# Altium footprint library Footprint-Lib-PhilsLab.PcbLib: 544 footprints (part 33 of 34)
Each footprint in its own frame and in the unit in brackets; x right, y up, seen from the top. Pads: shape width x height; smd on the part's side, far side on the other; paste and mask are expansions set on the pad; w line width, h text height; cw(c..) or ccw(c..) is an arc to the next point about the centre after c.
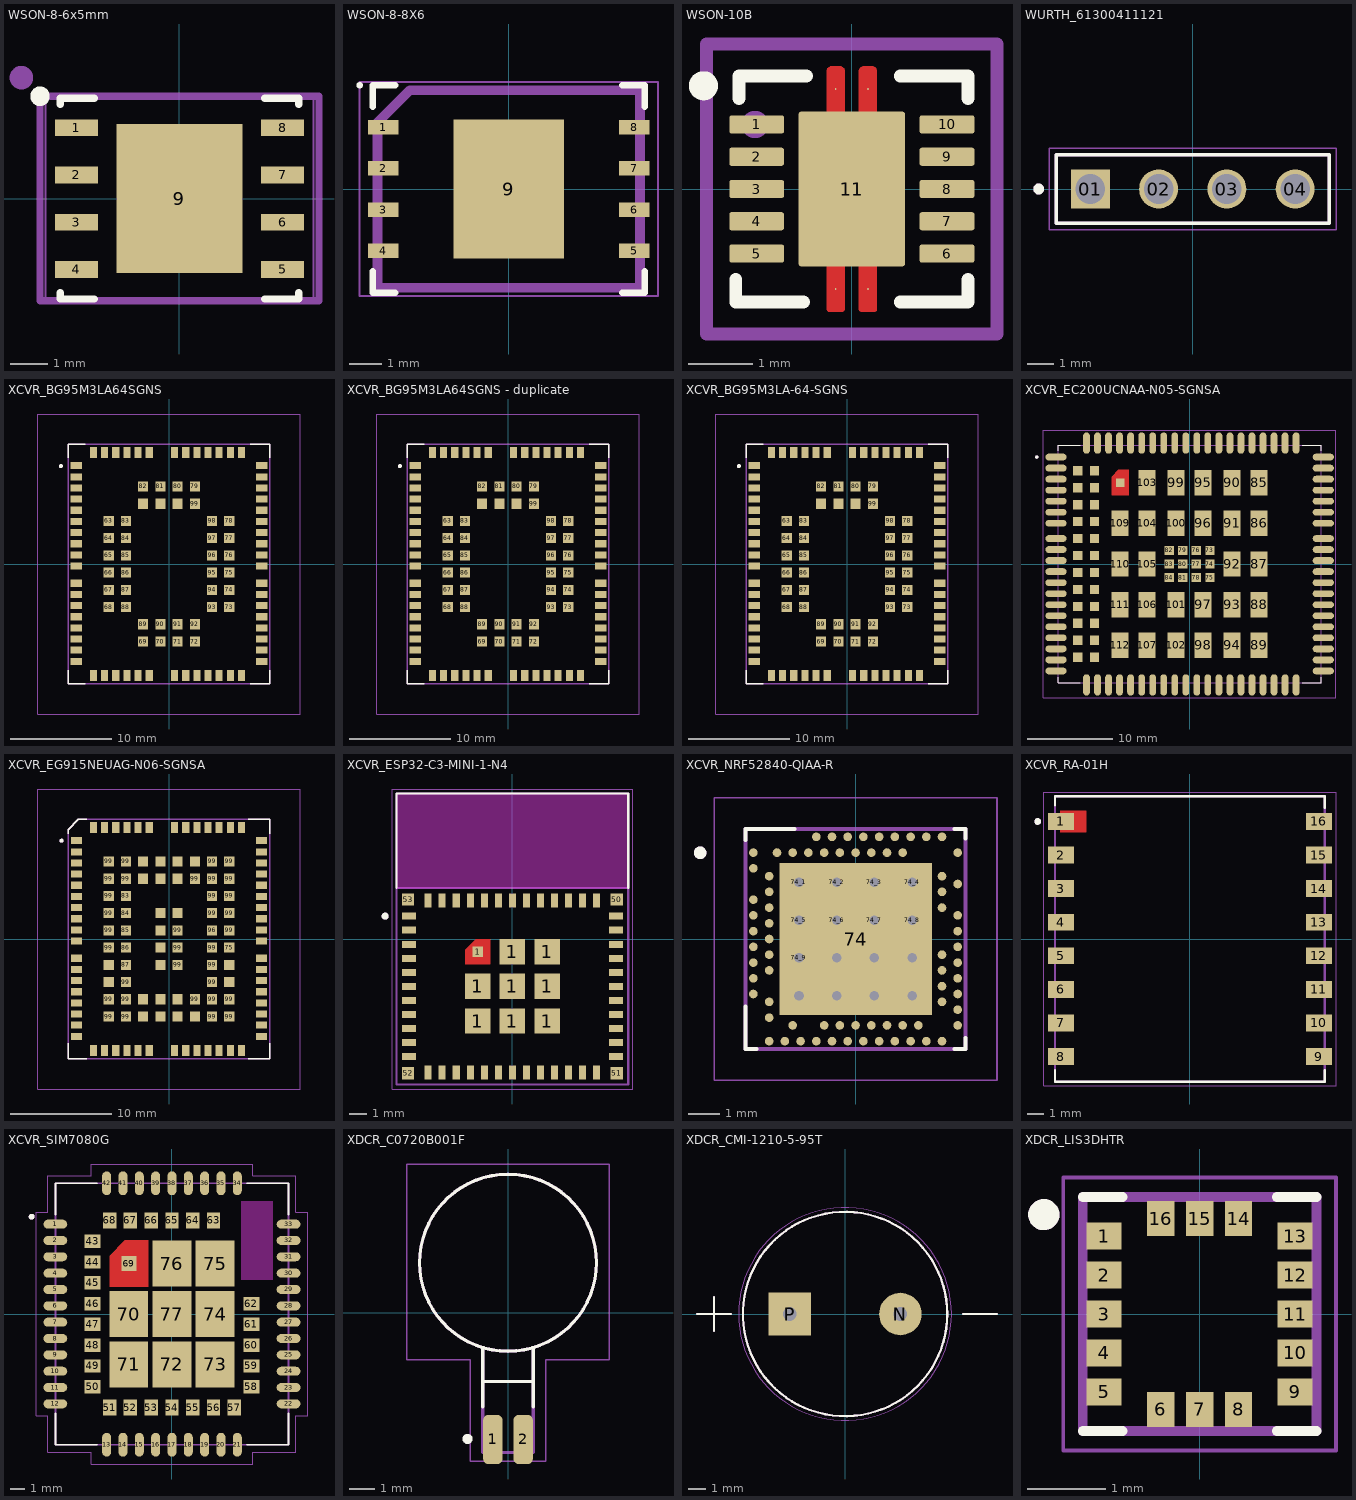
[diagram p32: the footprints below, top view; thin cyan lines are the x and y axes]

## WSON-8-6x5mm [mm]
height 0.8
pads (9):
  rect 1.15x0.45 smd: 1(-2.77,1.905) 2(-2.77,0.635) 3(-2.77,-0.635) 4(-2.77,-1.905) 5(2.77,-1.905) 6(2.77,-0.635) 7(2.77,0.635) 8(2.77,1.905)
  rect 3.4x4 smd paste-1.7: 9(0,0)
Top Overlay:
  circle w0.3: c-3.75,2.75 r0.112
  lines w0.2: -3.2,-2.53 -3.2,-2.7 -2.295,-2.7 ; -3.2,2.53 -3.2,2.7 -2.295,2.7 ; 2.295,-2.7 3.2,-2.7 3.2,-2.53 ; 2.295,2.7 3.2,2.7 3.2,2.53
Top Paste:
  rectangle: -1.595,0.765 -0.665,1.895
  rectangle: -1.595,-0.565 -0.665,0.565
  rectangle: -1.595,-1.895 -0.665,-0.765
  rectangle: -0.465,0.765 0.465,1.895
  rectangle: -0.465,-0.565 0.465,0.565
  rectangle: -0.465,-1.895 0.465,-0.765
  rectangle: 0.665,0.765 1.595,1.895
  rectangle: 0.665,-0.565 1.595,0.565
  rectangle: 0.665,-1.895 1.595,-0.765
Mechanical 13:
  circle w0.5: c-4.25,3.25 r0.064
  lines w0.2: -3.75,-2.75 -3.75,2.75 3.75,2.75 3.75,-2.75 -3.75,-2.75
  text "'.Designator'" at -5.815,-0.9 h1
Mechanical 15:
  lines w0.05: -3.605,-2.8 -3.605,2.8 3.605,2.8 3.605,-2.8 -3.605,-2.8
  lines w0.1: -0.5,0 0.5,0 ; 0,-0.5 0,0.5
3D body "WSON-8-6x5mm.step": height 0.8, standoff 0, extent -3.051,-2.55 3.051,2.55

## WSON-8-8X6 [mm] "8-Pad WSON 8x6-mm (Package Code E) (Winbond)"
height 0.8
pads (9):
  rect 0.95x0.45 smd: 1(-3.87,1.905) 2(-3.87,0.635) 3(-3.87,-0.635) 4(-3.87,-1.905) 5(3.87,-1.905) 6(3.87,-0.635) 7(3.87,0.635) 8(3.87,1.905)
  rect 3.4x4.3 smd paste-1.7: 9(0,0)
Top Overlay:
  circle w0.1: c-4.6,3.2 r0.05
  lines w0.2: -4.2,-2.53 -4.2,-3.2 -3.495,-3.2 ; -4.2,2.53 -4.2,3.2 -3.495,3.2 ; 3.495,-3.2 4.2,-3.2 4.2,-2.53 ; 3.495,3.2 4.2,3.2 4.2,2.53
Top Paste:
  rectangle: -1.595,0.815 -0.665,2.045
  rectangle: -1.595,-0.615 -0.665,0.615
  rectangle: -1.595,-2.045 -0.665,-0.815
  rectangle: -0.465,0.815 0.465,2.045
  rectangle: -0.465,-0.615 0.465,0.615
  rectangle: -0.465,-2.045 0.465,-0.815
  rectangle: 0.665,0.815 1.595,2.045
  rectangle: 0.665,-0.615 1.595,0.615
  rectangle: 0.665,-2.045 1.595,-0.815
Mechanical 13:
  lines w0.3: -4.05,-3.05 -4.05,2.05 -3.05,3.05 4.05,3.05 4.05,-3.05 -4.05,-3.05
  text "'.Designator'" at -5.84,-0.925 h1
Mechanical 15:
  lines w0.05: -4.605,-3.3 -4.605,3.3 4.605,3.3 4.605,-3.3 -4.605,-3.3
  lines w0.1: -0.5,0 0.5,0 ; 0,-0.5 0,0.5
3D body "WSON-8-8X6.step": height 0.8, standoff 0, extent -4.051,-3.05 4.051,3.05

## WSON-10B [mm]
height 0.75
pads (15):
  rrect25% 0.85x0.28 smd mask+0.05: 1(-1.475,1) 2(-1.475,0.5) 3(-1.475,0) 4(-1.475,-0.5) 5(-1.475,-1) 6(1.475,-1) 7(1.475,-0.5) 8(1.475,0) 9(1.475,0.5) 10(1.475,1)
  round 0.025 smd mask+0.12: 11(-0.25,-1.55) 11(-0.25,1.55) 11(0.25,-1.55) 11(0.25,1.55)
  rrect5% 1.65x2.4 smd mask+0.05: 11(0,0)
Top Layer:
  region: -0.11,1.83 -0.11,1.2 -0.39,1.2 -0.39,1.83 -0.39,1.844 -0.379,1.87 -0.36,1.889 -0.334,1.9 -0.32,1.9 -0.18,1.9 -0.166,1.9 -0.14,1.889 -0.121,1.87 -0.11,1.844
  region: 0.39,1.83 0.39,1.2 0.11,1.2 0.11,1.83 0.11,1.844 0.121,1.87 0.14,1.889 0.166,1.9 0.18,1.9 0.32,1.9 0.334,1.9 0.36,1.889 0.379,1.87 0.39,1.844
  region: 0.39,-1.865 0.39,-1.872 0.385,-1.885 0.375,-1.895 0.362,-1.9 0.355,-1.9 0.145,-1.9 0.138,-1.9 0.125,-1.895 0.115,-1.885 0.11,-1.872 0.11,-1.865 0.11,-1.2 0.39,-1.2
  region: -0.11,-1.865 -0.11,-1.872 -0.115,-1.885 -0.125,-1.895 -0.138,-1.9 -0.145,-1.9 -0.355,-1.9 -0.362,-1.9 -0.375,-1.895 -0.385,-1.885 -0.39,-1.872 -0.39,-1.865 -0.39,-1.2 -0.11,-1.2
Top Overlay:
  circle w0.25: c-2.3,1.6 r0.1
  lines w0.2: -1.8,-1.4 -1.8,-1.75 -0.75,-1.75 ; -1.75,1.4 -1.75,1.75 -0.7,1.75 ; 0.75,-1.75 1.8,-1.75 1.8,-1.4 ; 0.75,1.75 1.8,1.75 1.8,1.4
Mechanical 13:
  circle w0.3: c-1.5,1 r0.061
  lines w0.2: -2.25,-2.25 2.25,-2.25 2.25,2.25 -2.25,2.25 -2.25,-2.25
  text "'.Designator'" at -5.665,-0.417 h1
3D body "TCKE812NL,RF.stp": height 0.85, standoff 0, extent -1.5,-1.5 1.5,1.5

## WURTH_61300411121 [mm]
pads (4):
  rect 1.45x1.45 / inner round 1.45 / far side rect 1.45x1.45 hole 1.1 mask+0.05: 01(-3.81,0)
  round 1.45 hole 1.1 mask+0.05: 02(-1.27,0) 03(1.27,0) 04(3.81,0)
Top Overlay:
  circle w0.2: c-5.73,0 r0.1
  lines w0.127: -5.08,-1.27 5.08,-1.27 5.08,1.27 -5.08,1.27 -5.08,-1.27
Mechanical 13:
  circle w0.2: c-5.73,0 r0.1
  lines w0.127: -5.08,-1.27 5.08,-1.27 5.08,1.27 -5.08,1.27 -5.08,-1.27
Mechanical 15:
  lines w0.05: -5.33,-1.52 5.33,-1.52 5.33,1.52 -5.33,1.52 -5.33,-1.52

## XCVR_BG95M3LA64SGNS [mm]
pads (102):
  rect 1.1x0.7 smd paste-2: 1(-9.15,9.7) 2(-9.15,8.6) 3(-9.15,7.5) 4(-9.15,6.4) 5(-9.15,5.3) 6(-9.15,4.2) 7(-9.15,3.1) 8(-9.15,2) 9(-9.15,0.9) 10(-9.15,-0.2) 11(-9.15,-1.9) 12(-9.15,-3) 13(-9.15,-4.1) 14(-9.15,-5.2) 15(-9.15,-6.3) 16(-9.15,-7.4) 17(-9.15,-8.5) 18(-9.15,-9.6) 32(9.15,-9.6) 33(9.15,-8.5) 34(9.15,-7.4) 35(9.15,-6.3) 36(9.15,-5.2) 37(9.15,-4.1) 38(9.15,-3) 39(9.15,-1.9) 40(9.15,-0.2) 41(9.15,0.9) 42(9.15,2) 43(9.15,3.1) 44(9.15,4.2) 45(9.15,5.3) 46(9.15,6.4) 47(9.15,7.5) 48(9.15,8.6) 49(9.15,9.7)
  rect 0.7x1.1 smd paste-2: 19(-7.45,-11) 20(-6.35,-11) 21(-5.25,-11) 22(-4.15,-11) 23(-3.05,-11) 24(-1.95,-11) 25(0.55,-11) 26(1.65,-11) 27(2.75,-11) 28(3.85,-11) 29(4.95,-11) 30(6.05,-11) 31(7.15,-11) 50(7.15,11) 51(6.05,11) 52(4.95,11) 53(3.85,11) 54(2.75,11) 55(1.65,11) 56(0.55,11) 57(-1.95,11) 58(-3.05,11) 59(-4.15,11) 60(-5.25,11) 61(-6.35,11) 62(-7.45,11)
  rect 1x1 smd paste-1: 63(-5.95,4.25) 64(-5.95,2.55) 65(-5.95,0.85) 66(-5.95,-0.85) 67(-5.95,-2.55) 68(-5.95,-4.25) 69(-2.55,-7.65) 70(-0.85,-7.65) 71(0.85,-7.65) 72(2.55,-7.65) 73(5.95,-4.25) 74(5.95,-2.55) 75(5.95,-0.85) 76(5.95,0.85) 77(5.95,2.55) 78(5.95,4.25) 79(2.55,7.65) 80(0.85,7.65) 81(-0.85,7.65) 82(-2.55,7.65) 83(-4.25,4.25) 84(-4.25,2.55) 85(-4.25,0.85) 86(-4.25,-0.85) 87(-4.25,-2.55) 88(-4.25,-4.25) 89(-2.55,-5.95) 90(-0.85,-5.95) 91(0.85,-5.95) 92(2.55,-5.95) 93(4.25,-4.25) 94(4.25,-2.55) 95(4.25,-0.85) 96(4.25,0.85) 97(4.25,2.55) 98(4.25,4.25) 99(2.55,5.95) 100(0.85,5.95) 101(-0.85,5.95) 102(-2.55,5.95)
Top Overlay:
  circle w0.2: c-10.67,9.66 r0.1
  lines w0.127: -9.95,-10.5 -9.95,-11.8 -8.25,-11.8 ; -9.95,10.5 -9.95,11.8 -8.25,11.8 ; 8,-11.8 9.95,-11.8 9.95,-10.5 ; 8,11.8 9.95,11.8 9.95,10.5
Top Paste:
  drawing of 102 lines, arcs and shapes, not listed
Mechanical 13:
  circle w0.2: c-10.67,9.66 r0.1
  lines w0.127: -9.95,-11.8 -9.95,11.8 9.95,11.8 9.95,-11.8 -9.95,-11.8
Mechanical 15:
  lines w0.05: -12.95,-14.8 12.95,-14.8 12.95,14.8 -12.95,14.8 -12.95,-14.8
3D body "step_temp.STEP": height 0, standoff -2.1, extent -8,-9.35 8,9.35

## XCVR_BG95M3LA64SGNS - duplicate [mm]
pads (102):
  rect 1.1x0.7 smd paste-2: 1(-9.15,9.7) 2(-9.15,8.6) 3(-9.15,7.5) 4(-9.15,6.4) 5(-9.15,5.3) 6(-9.15,4.2) 7(-9.15,3.1) 8(-9.15,2) 9(-9.15,0.9) 10(-9.15,-0.2) 11(-9.15,-1.9) 12(-9.15,-3) 13(-9.15,-4.1) 14(-9.15,-5.2) 15(-9.15,-6.3) 16(-9.15,-7.4) 17(-9.15,-8.5) 18(-9.15,-9.6) 32(9.15,-9.6) 33(9.15,-8.5) 34(9.15,-7.4) 35(9.15,-6.3) 36(9.15,-5.2) 37(9.15,-4.1) 38(9.15,-3) 39(9.15,-1.9) 40(9.15,-0.2) 41(9.15,0.9) 42(9.15,2) 43(9.15,3.1) 44(9.15,4.2) 45(9.15,5.3) 46(9.15,6.4) 47(9.15,7.5) 48(9.15,8.6) 49(9.15,9.7)
  rect 0.7x1.1 smd paste-2: 19(-7.45,-11) 20(-6.35,-11) 21(-5.25,-11) 22(-4.15,-11) 23(-3.05,-11) 24(-1.95,-11) 25(0.55,-11) 26(1.65,-11) 27(2.75,-11) 28(3.85,-11) 29(4.95,-11) 30(6.05,-11) 31(7.15,-11) 50(7.15,11) 51(6.05,11) 52(4.95,11) 53(3.85,11) 54(2.75,11) 55(1.65,11) 56(0.55,11) 57(-1.95,11) 58(-3.05,11) 59(-4.15,11) 60(-5.25,11) 61(-6.35,11) 62(-7.45,11)
  rect 1x1 smd paste-1: 63(-5.95,4.25) 64(-5.95,2.55) 65(-5.95,0.85) 66(-5.95,-0.85) 67(-5.95,-2.55) 68(-5.95,-4.25) 69(-2.55,-7.65) 70(-0.85,-7.65) 71(0.85,-7.65) 72(2.55,-7.65) 73(5.95,-4.25) 74(5.95,-2.55) 75(5.95,-0.85) 76(5.95,0.85) 77(5.95,2.55) 78(5.95,4.25) 79(2.55,7.65) 80(0.85,7.65) 81(-0.85,7.65) 82(-2.55,7.65) 83(-4.25,4.25) 84(-4.25,2.55) 85(-4.25,0.85) 86(-4.25,-0.85) 87(-4.25,-2.55) 88(-4.25,-4.25) 89(-2.55,-5.95) 90(-0.85,-5.95) 91(0.85,-5.95) 92(2.55,-5.95) 93(4.25,-4.25) 94(4.25,-2.55) 95(4.25,-0.85) 96(4.25,0.85) 97(4.25,2.55) 98(4.25,4.25) 99(2.55,5.95) 100(0.85,5.95) 101(-0.85,5.95) 102(-2.55,5.95)
Top Overlay:
  circle w0.2: c-10.67,9.66 r0.1
  lines w0.127: -9.95,-10.5 -9.95,-11.8 -8.25,-11.8 ; -9.95,10.5 -9.95,11.8 -8.25,11.8 ; 8,-11.8 9.95,-11.8 9.95,-10.5 ; 8,11.8 9.95,11.8 9.95,10.5
Top Paste:
  drawing of 102 lines, arcs and shapes, not listed
Mechanical 13:
  circle w0.2: c-10.67,9.66 r0.1
  lines w0.127: -9.95,-11.8 -9.95,11.8 9.95,11.8 9.95,-11.8 -9.95,-11.8
Mechanical 15:
  lines w0.05: -12.95,-14.8 12.95,-14.8 12.95,14.8 -12.95,14.8 -12.95,-14.8
3D body "step_temp.STEP": height 2.54, standoff 0.44, extent -7.493,-8.382 8.507,10.318

## XCVR_BG95M3LA-64-SGNS [mm]
pads (102):
  rect 1.1x0.7 smd paste-2: 1(-9.15,9.7) 2(-9.15,8.6) 3(-9.15,7.5) 4(-9.15,6.4) 5(-9.15,5.3) 6(-9.15,4.2) 7(-9.15,3.1) 8(-9.15,2) 9(-9.15,0.9) 10(-9.15,-0.2) 11(-9.15,-1.9) 12(-9.15,-3) 13(-9.15,-4.1) 14(-9.15,-5.2) 15(-9.15,-6.3) 16(-9.15,-7.4) 17(-9.15,-8.5) 18(-9.15,-9.6) 32(9.15,-9.6) 33(9.15,-8.5) 34(9.15,-7.4) 35(9.15,-6.3) 36(9.15,-5.2) 37(9.15,-4.1) 38(9.15,-3) 39(9.15,-1.9) 40(9.15,-0.2) 41(9.15,0.9) 42(9.15,2) 43(9.15,3.1) 44(9.15,4.2) 45(9.15,5.3) 46(9.15,6.4) 47(9.15,7.5) 48(9.15,8.6) 49(9.15,9.7)
  rect 0.7x1.1 smd paste-2: 19(-7.45,-11) 20(-6.35,-11) 21(-5.25,-11) 22(-4.15,-11) 23(-3.05,-11) 24(-1.95,-11) 25(0.55,-11) 26(1.65,-11) 27(2.75,-11) 28(3.85,-11) 29(4.95,-11) 30(6.05,-11) 31(7.15,-11) 50(7.15,11) 51(6.05,11) 52(4.95,11) 53(3.85,11) 54(2.75,11) 55(1.65,11) 56(0.55,11) 57(-1.95,11) 58(-3.05,11) 59(-4.15,11) 60(-5.25,11) 61(-6.35,11) 62(-7.45,11)
  rect 1x1 smd paste-1: 63(-5.95,4.25) 64(-5.95,2.55) 65(-5.95,0.85) 66(-5.95,-0.85) 67(-5.95,-2.55) 68(-5.95,-4.25) 69(-2.55,-7.65) 70(-0.85,-7.65) 71(0.85,-7.65) 72(2.55,-7.65) 73(5.95,-4.25) 74(5.95,-2.55) 75(5.95,-0.85) 76(5.95,0.85) 77(5.95,2.55) 78(5.95,4.25) 79(2.55,7.65) 80(0.85,7.65) 81(-0.85,7.65) 82(-2.55,7.65) 83(-4.25,4.25) 84(-4.25,2.55) 85(-4.25,0.85) 86(-4.25,-0.85) 87(-4.25,-2.55) 88(-4.25,-4.25) 89(-2.55,-5.95) 90(-0.85,-5.95) 91(0.85,-5.95) 92(2.55,-5.95) 93(4.25,-4.25) 94(4.25,-2.55) 95(4.25,-0.85) 96(4.25,0.85) 97(4.25,2.55) 98(4.25,4.25) 99(2.55,5.95) 100(0.85,5.95) 101(-0.85,5.95) 102(-2.55,5.95)
Top Overlay:
  circle w0.2: c-10.67,9.66 r0.1
  lines w0.127: -9.95,-10.5 -9.95,-11.8 -8.25,-11.8 ; -9.95,10.5 -9.95,11.8 -8.25,11.8 ; 8,-11.8 9.95,-11.8 9.95,-10.5 ; 8,11.8 9.95,11.8 9.95,10.5
Top Paste:
  drawing of 102 lines, arcs and shapes, not listed
Mechanical 13:
  circle w0.2: c-10.67,9.66 r0.1
  lines w0.127: -9.95,-11.8 -9.95,11.8 9.95,11.8 9.95,-11.8 -9.95,-11.8
Mechanical 15:
  lines w0.05: -12.95,-14.8 12.95,-14.8 12.95,14.8 -12.95,14.8 -12.95,-14.8
3D body "BG95M3LA64SGNS.STEP": height 2.4, standoff 0, extent -9.95,-11.8 9.95,11.8

## XCVR_EC200UCNAA-N05-SGNSA [mm]
height 2.6
pads (144):
  oval 2.5x0.8 smd: 1(-15.75,12.6) 2(-15.75,11.3) 3(-15.75,10) 4(-15.75,8.7) 5(-15.75,7.4) 6(-15.75,6.1) 7(-15.75,4.8) 8(-15.75,0.4) 9(-15.75,-0.9) 10(-15.75,-2.2) 11(-15.75,-3.5) 12(-15.75,-4.8) 13(-15.75,-6.1) 14(-15.75,-7.4) 15(-15.75,-8.7) 16(-15.75,-10) 17(-15.75,-11.3) 18(-15.75,-12.6) 37(15.75,-12.6) 38(15.75,-11.3) 39(15.75,-10) 40(15.75,-8.7) 41(15.75,-7.4) 42(15.75,-6.1) 43(15.75,-4.8) 44(15.75,-3.5) 45(15.75,-2.2) 46(15.75,-0.9) 47(15.75,0.4) 48(15.75,4.8) 49(15.75,6.1) 50(15.75,7.4) 51(15.75,8.7) 52(15.75,10) 53(15.75,11.3) 54(15.75,12.6) 141(-15.75,3) 142(-15.75,1.7) 143(15.75,1.7) 144(15.75,3)
  oval 0.8x2.5 smd: 19(-9.55,-14.25) 20(-8.25,-14.25) 21(-6.95,-14.25) 22(-5.65,-14.25) 23(-4.35,-14.25) 24(-3.05,-14.25) 25(-1.75,-14.25) 26(-0.45,-14.25) 27(0.85,-14.25) 28(2.15,-14.25) 29(3.45,-14.25) 30(4.75,-14.25) 31(6.05,-14.25) 32(7.35,-14.25) 33(8.65,-14.25) 34(9.95,-14.25) 35(11.25,-14.25) 36(12.55,-14.25) 55(12.55,14.25) 56(11.25,14.25) 57(9.95,14.25) 58(8.65,14.25) 59(7.35,14.25) 60(6.05,14.25) 61(4.75,14.25) 62(3.45,14.25) 63(2.15,14.25) 64(0.85,14.25) 65(-0.45,14.25) 66(-1.75,14.25) 67(-3.05,14.25) 68(-4.35,14.25) 69(-5.65,14.25) 70(-6.95,14.25) 71(-8.25,14.25) 72(-9.55,14.25) 113(-10.85,14.25) 114(-12.15,14.25) 115(-10.85,-14.25) 116(-12.15,-14.25)
  rect 1.1x1.1 smd: 73(2.4,1.6) 74(2.4,0) 75(2.4,-1.6) 76(0.8,1.6) 77(0.8,0) 78(0.8,-1.6) 79(-0.8,1.6) 80(-0.8,0) 81(-0.8,-1.6) 82(-2.4,1.6) 83(-2.4,0) 84(-2.4,-1.6) 117(-11.2,11) 118(-11.2,9) 119(-11.2,7) 120(-11.2,5) 121(-11.2,3) 122(-11.2,1) 123(-11.2,-1) 124(-11.2,-3) 125(-11.2,-5) 126(-11.2,-7) 127(-11.2,-9) 128(-11.2,-11) 129(-13.2,11) 130(-13.2,9) 131(-13.2,7) 132(-13.2,5) 133(-13.2,3) 134(-13.2,1) 135(-13.2,-1) 136(-13.2,-3) 137(-13.2,-5) 138(-13.2,-7) 139(-13.2,-9) 140(-13.2,-11)
  rect 2x3 smd: 85(8.2,9.6) 86(8.2,4.8) 87(8.2,0) 88(8.2,-4.8) 89(8.2,-9.6) 90(5,9.6) 91(5,4.8) 92(5,0) 93(5,-4.8) 94(5,-9.6) 95(1.6,9.6) 96(1.6,4.8) 97(1.6,-4.8) 98(1.6,-9.6) 99(-1.6,9.6) 100(-1.6,4.8) 101(-1.6,-4.8) 102(-1.6,-9.6) 103(-5,9.6) 104(-5,4.8) 105(-5,0) 106(-5,-4.8) 107(-5,-9.6) 109(-8.2,4.8) 110(-8.2,0) 111(-8.2,-4.8) 112(-8.2,-9.6)
  rect 1x1 smd paste-1 mask+0: 108(-8.2,9.6)
Top Layer:
  region: -7.2,8.1 -9.2,8.1 -9.2,10.3 -8.4,11.1 -7.2,11.1
Top Overlay:
  circle w0.2: c-18,12.6 r0.1
  lines w0.127: -15.5,-13.32 -15.5,-14 -12.87,-14 ; -15.5,13.32 -15.5,14 -12.87,14 ; 13.27,-14 15.5,-14 15.5,-13.32 ; 13.27,14 15.5,14 15.5,13.32
Top Paste:
  region: -7.2,8.1 -9.2,8.1 -9.2,10.3 -8.4,11.1 -7.2,11.1
Top Solder:
  region: -7.1,8 -9.3,8 -9.3,10.35 -8.45,11.2 -7.1,11.2
Mechanical 13:
  circle w0.2: c-18,12.6 r0.1
  lines w0.127: -15.5,-14 -15.5,14 15.5,14 15.5,-14 -15.5,-14
Mechanical 15:
  lines w0.05: -17.25,-15.75 17.25,-15.75 17.25,15.75 -17.25,15.75 -17.25,-15.75
3D body "step_temp.STEP": height 1.93, standoff -0.42, extent -15.5,-14 15.5,14

## XCVR_EG915NEUAG-N06-SGNSA [mm]
pads (126):
  rect 1.05x0.7 smd: 1(-9.125,9.7) 2(-9.125,8.6) 4(-9.125,6.4) 5(-9.125,5.3) 6(-9.125,4.2) 7(-9.125,3.1) 8(-9.125,2) 9(-9.125,0.9) 10(-9.125,-0.2) 15(-9.125,-6.3) 17(-9.125,-8.5) 18(-9.125,-9.6) 32(9.125,-9.6) 33(9.125,-8.5) 34(9.125,-7.4) 35(9.125,-6.3) 36(9.125,-5.2) 37(9.125,-4.1) 38(9.125,-3) 39(9.125,-1.9) 40(9.125,-0.2) 41(9.125,0.9) 42(9.125,2) 43(9.125,3.1) 44(9.125,4.2) 45(9.125,5.3) 46(9.125,6.4) 47(9.125,7.5) 49(9.125,9.7) 99(-9.125,-7.4) 99(-9.125,-5.2) 99(-9.125,-4.1) 99(-9.125,-3) 99(-9.125,-1.9) 100(-9.125,7.5) 100(9.125,8.6)
  rect 0.7x1.05 smd: 19(-7.45,-11) 20(-6.35,-11) 21(-5.25,-11) 22(-4.15,-11) 23(-3.05,-11) 24(-1.95,-11) 25(0.55,-11) 26(1.65,-11) 27(2.75,-11) 28(3.85,-11) 29(4.95,-11) 30(6.05,-11) 51(6.05,11) 52(4.95,11) 53(3.85,11) 60(-5.25,11) 99(-1.95,11) 99(0.55,11) 100(-7.45,11) 100(-6.35,11) 100(-4.15,11) 100(-3.05,11) 100(1.65,11) 100(2.75,11) 100(7.15,-11) 100(7.15,11)
  rect 1x1 smd: 75(5.95,-0.85) 83(-4.25,4.25) 84(-4.25,2.55) 85(-4.25,0.85) 86(-4.25,-0.85) 87(-4.25,-2.55) 96(4.25,0.85) 99(-5.95,-7.65) 99(-5.95,-5.95) 99(-5.95,-0.85) 99(-5.95,0.85) 99(-5.95,2.55) 99(-5.95,4.25) 99(-5.95,5.95) 99(-5.95,7.65) 99(-4.25,-7.65) 99(-4.25,-5.95) 99(-4.25,-4.25) 99(-4.25,5.95) 99(-4.25,7.65) 99(0.85,-2.55) 99(0.85,-0.85) 99(0.85,0.85) 99(2.55,-5.95) 99(2.55,5.95) 99(4.25,-7.65) 99(4.25,-5.95) 99(4.25,-4.25) 99(4.25,-2.55) 99(4.25,-0.85) 99(4.25,2.55) 99(4.25,4.25) 99(4.25,5.95) 99(4.25,7.65) 99(5.95,-7.65) 99(5.95,-5.95) 99(5.95,0.85) 99(5.95,2.55) 99(5.95,4.25) 99(5.95,5.95) 99(5.95,7.65) 100(-5.95,-4.25) 100(-5.95,-2.55) 100(-2.55,-7.65) 100(-2.55,-5.95) 100(-2.55,5.95) 100(-2.55,7.65) 100(-0.85,-7.65) 100(-0.85,-5.95) 100(-0.85,5.95) 100(-0.85,7.65) 100(0.85,-7.65) 100(0.85,-5.95) 100(0.85,5.95) 100(0.85,7.65) 100(2.55,-7.65) 100(2.55,7.65) 100(5.95,-4.25) 100(5.95,-2.55) 119(-0.85,2.55) 120(-0.85,0.85) 121(-0.85,-0.85) 122(-0.85,-2.55) 126(0.85,2.55)
Top Overlay:
  circle w0.2: c-10.6,9.7 r0.1
  lines w0.127: -9.95,-10.27 -9.95,-11.8 -8.12,-11.8 ; -9.95,10.37 -9.95,10.8 -8.95,11.8 -8.12,11.8 ; 7.82,-11.8 9.95,-11.8 9.95,-10.27 ; 7.82,11.8 9.95,11.8 9.95,10.37
Mechanical 13:
  circle w0.2: c-10.6,9.7 r0.1
  lines w0.127: -9.95,-11.8 -9.95,10.8 -8.95,11.8 9.95,11.8 9.95,-11.8 -9.95,-11.8
Mechanical 15:
  lines w0.05: -12.95,-14.8 12.95,-14.8 12.95,14.8 -12.95,14.8 -12.95,-14.8
3D body "step_temp.STEP": height 2.6, standoff 0, extent -9.95,-11.8 9.95,11.8

## XCVR_ESP32-C3-MINI-1-N4 [mm]
height 2.55
pads (61):
  rect 0.8x0.4 smd: 1(-5.9,1.3) 2(-5.9,0.5) 3(-5.9,-0.3) 4(-5.9,-5.9) 4(-5.9,-5.1) 4(-5.9,-3.5) 4(-5.9,-1.1) 4(5.9,-6.7) 4(5.9,-4.3) 4(5.9,-3.5) 4(5.9,-1.1) 4(5.9,-0.3) 4(5.9,0.5) 4(5.9,1.3) 5(-5.9,-1.9) 6(-5.9,-2.7) 8(-5.9,-4.3) 11(-5.9,-6.7) 26(5.9,-5.9) 27(5.9,-5.1) 30(5.9,-2.7) 31(5.9,-1.9)
  rect 1.45x1.45 smd: 1(-1.975,-4.675) 1(-1.975,-2.7) 1(0,-4.675) 1(0,-2.7) 1(0,-0.725) 1(1.975,-4.675) 1(1.975,-2.7) 1(1.975,-0.725)
  rect 0.6x0.6 smd paste-1 mask+0: 1(-1.975,-0.725)
  rect 0.4x0.8 smd: 4(-2.4,-7.6) 4(-0.8,-7.6) 4(4.8,-7.6) 12(-4.8,-7.6) 13(-4,-7.6) 14(-3.2,-7.6) 16(-1.6,-7.6) 18(0,-7.6) 19(0.8,-7.6) 20(1.6,-7.6) 21(2.4,-7.6) 22(3.2,-7.6) 23(4,-7.6) 36(4.8,2.2) 37(4,2.2) 38(3.2,2.2) 39(2.4,2.2) 40(1.6,2.2) 41(0.8,2.2) 42(0,2.2) 43(-0.8,2.2) 44(-1.6,2.2) 45(-2.4,2.2) 46(-3.2,2.2) 47(-4,2.2) 48(-4.8,2.2)
  rect 0.7x0.7 smd: 50(5.95,2.25) 51(5.95,-7.65) 52(-5.95,-7.65) 53(-5.95,2.25)
Top Layer:
  region: -1.25,-1.45 -2.7,-1.45 -2.7,-0.6 -2.1,0 -1.25,0
Top Overlay:
  circle w0.2: c-7.25,1.3 r0.1
  lines w0.127: -6.6,2.92 -6.6,8.3 6.6,8.3 6.6,2.92
Top Paste:
  region: -1.25,-1.45 -2.7,-1.45 -2.7,-0.6 -2.1,0 -1.25,0
Top Solder:
  region: -1.15,-1.55 -2.8,-1.55 -2.8,-0.56 -2.14,0.1 -1.15,0.1
Keep-Out Layer:
  region: 6.6,2.9 -6.6,2.9 -6.6,8.3 6.6,8.3
  region: 6.6,2.9 -6.6,2.9 -6.6,8.3 6.6,8.3
Mechanical 13:
  circle w0.2: c-7.25,1.3 r0.1
  lines w0.127: -6.6,2.9 -6.6,-8.3 6.6,-8.3 6.6,2.9 ; -6.6,2.9 -6.6,8.3 6.6,8.3 6.6,2.9 ; -6.6,2.9 6.6,2.9
Mechanical 15:
  lines w0.05: -6.85,-8.55 -6.85,8.55 6.85,8.55 6.85,-8.55 -6.85,-8.55
3D body "step_temp.STEP": height 2.55, standoff 0, extent -6.6,-8.3 6.6,8.3

## XCVR_NRF52840-QIAA-R [mm]
height 0.85
pads (90):
  rect 4.85x4.85 smd paste-3: 74(0,0)
  round 0.6 hole 0.305 mask+0: 74_1(-1.8,1.8) 74_2(-0.6,1.8) 74_3(0.6,1.8) 74_4(1.8,1.8) 74_5(-1.8,0.6) 74_6(-0.6,0.6) 74_7(0.6,0.6) 74_8(1.8,0.6) 74_9(-1.8,-0.6) 74_10(-0.6,-0.6) 74_11(0.6,-0.6) 74_12(1.8,-0.6) 74_13(-1.8,-1.8) 74_14(-0.6,-1.8) 74_15(0.6,-1.8) 74_16(1.8,-1.8)
  round 0.275 smd: A8(-1.25,3.25) A10(-0.75,3.25) A12(-0.25,3.25) A14(0.25,3.25) A16(0.75,3.25) A18(1.25,3.25) A20(1.75,3.25) A22(2.25,3.25) A23(2.75,3.25) AA24(3.25,-2.25) AB2(-2.75,-2.5) AC5(-2,-2.75) AC9(-1,-2.75) AC11(-0.5,-2.75) AC13(0,-2.75) AC15(0.5,-2.75) AC17(1,-2.75) AC19(1.5,-2.75) AC21(2,-2.75) AC24(3.25,-2.75) AD2(-2.75,-3.25) AD4(-2.25,-3.25) AD6(-1.75,-3.25) AD8(-1.25,-3.25) AD10(-0.75,-3.25) AD12(-0.25,-3.25) AD14(0.25,-3.25) AD16(0.75,-3.25) AD18(1.25,-3.25) AD20(1.75,-3.25) AD22(2.25,-3.25) AD23(2.75,-3.25) B1(-3.25,2.75) B3(-2.5,2.75) B5(-2,2.75) B7(-1.5,2.75) B9(-1,2.75) B11(-0.5,2.75) B13(0,2.75) B15(0.5,2.75) B17(1,2.75) B19(1.5,2.75) B24(3.25,2.75) C1(-3.25,2.25) D2(-2.75,2) D23(2.75,2) E24(3.25,1.75) F2(-2.75,1.5) F23(2.75,1.5) G1(-3.25,1.25) H2(-2.75,1) H23(2.75,1) J1(-3.25,0.75) J24(3.25,0.75) K2(-2.75,0.5) L1(-3.25,0.25) L24(3.25,0.25) M2(-2.75,0) N1(-3.25,-0.25) N24(3.25,-0.25) P2(-2.75,-0.5) P23(2.75,-0.5) R1(-3.25,-0.75) R24(3.25,-0.75) T2(-2.75,-1) T23(2.75,-1) U1(-3.25,-1.25) U24(3.25,-1.25) V23(2.75,-1.5) W1(-3.25,-1.75) W24(3.25,-1.75) Y2(-2.75,-2) Y23(2.75,-2)
Top Overlay:
  circle w0.2: c-4.945,2.743 r0.1
  lines w0.127: -3.5,-2.15 -3.5,-3.5 -3.15,-3.5 ; -3.5,3.15 -3.5,3.5 -1.95,3.5 ; 3.15,-3.5 3.5,-3.5 3.5,-3.15 ; 3.15,3.5 3.5,3.5 3.5,3.2
Top Paste:
  region: 2.075,0.355 0.355,0.355 0.355,2.075 2.075,2.075
  region: -0.355,0.355 -2.075,0.355 -2.075,2.075 -0.355,2.075
  region: 2.075,-2.075 0.355,-2.075 0.355,-0.355 2.075,-0.355
  region: -0.355,-2.075 -2.075,-2.075 -2.075,-0.355 -0.355,-0.355
Mechanical 13:
  circle w0.2: c-4.945,2.743 r0.1
  lines w0.127: -3.5,-3.5 3.5,-3.5 3.5,3.5 -3.5,3.5 -3.5,-3.5
Mechanical 15:
  lines w0.05: -4.5,-4.5 -4.5,4.5 4.5,4.5 4.5,-4.5 -4.5,-4.5
3D body "step_temp.STEP": height 0.85, standoff 0, extent -3.5,-3.5 3.5,3.5

## XCVR_RA-01H [mm]
height 3.4
pads (16):
  rect 1.536x1 smd paste-2 mask+0: 1(-7.682,7)
  rect 1.536x1 smd: 2(-7.682,5) 3(-7.682,3) 4(-7.682,1) 5(-7.682,-1) 6(-7.682,-3) 7(-7.682,-5) 8(-7.682,-7) 9(7.682,-7) 10(7.682,-5) 11(7.682,-3) 12(7.682,-1) 13(7.682,1) 14(7.682,3) 15(7.682,5) 16(7.682,7)
Top Layer:
  region: -6.188,6.365 -7.724,6.365 -7.724,6.5 -8.45,6.5 -8.45,7.5 -7.724,7.5 -7.724,7.635 -6.188,7.635
Top Overlay:
  circle w0.2: c-9.069,7 r0.1
  lines w0.127: -8.031,-7.82 -8.031,-8.5 8.031,-8.5 8.031,-7.82 ; -8.031,7.955 -8.031,8.5 8.031,8.5 8.031,7.82
Top Paste:
  region: -6.188,6.365 -7.724,6.365 -7.724,6.5 -8.45,6.5 -8.45,7.5 -7.724,7.5 -7.724,7.635 -6.188,7.635
Top Solder:
  region: -6.088,6.265 -7.824,6.265 -7.824,6.4 -8.55,6.4 -8.55,7.6 -7.824,7.6 -7.824,7.735 -6.088,7.735
Mechanical 13:
  circle w0.2: c-9.069,7 r0.1
  lines w0.127: -8.031,-8.5 -8.031,8.5 8.031,8.5 8.031,-8.5 -8.031,-8.5
Mechanical 15:
  lines w0.05: -8.7,-8.75 8.7,-8.75 8.7,8.75 -8.7,8.75 -8.7,-8.75
3D body "step_temp.STEP": height 3.4, standoff 0, extent -8,-8.5 8,8.5

## XCVR_SIM7080G [mm]
pads (77):
  oval 1.6x0.6 smd paste-2: 1(-7.85,6.05) 2(-7.85,4.95) 3(-7.85,3.85) 4(-7.85,2.75) 5(-7.85,1.65) 6(-7.85,0.55) 7(-7.85,-0.55) 8(-7.85,-1.65) 9(-7.85,-2.75) 10(-7.85,-3.85) 11(-7.85,-4.95) 12(-7.85,-6.05) 22(7.85,-6.05) 23(7.85,-4.95) 24(7.85,-3.85) 25(7.85,-2.75) 26(7.85,-1.65) 27(7.85,-0.55) 28(7.85,0.55) 29(7.85,1.65) 30(7.85,2.75) 31(7.85,3.85) 32(7.85,4.95) 33(7.85,6.05)
  oval 0.6x1.6 smd paste-2: 13(-4.4,-8.8) 14(-3.3,-8.8) 15(-2.2,-8.8) 16(-1.1,-8.8) 17(0,-8.8) 18(1.1,-8.8) 19(2.2,-8.8) 20(3.3,-8.8) 21(4.4,-8.8) 34(4.4,8.8) 35(3.3,8.8) 36(2.2,8.8) 37(1.1,8.8) 38(0,8.8) 39(-1.1,8.8) 40(-2.2,8.8) 41(-3.3,8.8) 42(-4.4,8.8)
  rect 1.1x0.9 smd paste-2: 43(-5.35,4.9) 44(-5.35,3.5) 45(-5.35,2.1) 46(-5.35,0.7) 47(-5.35,-0.7) 48(-5.35,-2.1) 49(-5.35,-3.5) 50(-5.35,-4.9) 58(5.35,-4.9) 59(5.35,-3.5) 60(5.35,-2.1) 61(5.35,-0.7) 62(5.35,0.7)
  rect 0.9x1.1 smd paste-2: 51(-4.2,-6.3) 52(-2.8,-6.3) 53(-1.4,-6.3) 54(0,-6.3) 55(1.4,-6.3) 56(2.8,-6.3) 57(4.2,-6.3) 63(2.8,6.3) 64(1.4,6.3) 65(0,6.3) 66(-1.4,6.3) 67(-2.8,6.3) 68(-4.2,6.3)
  rect 1x1 smd paste-1 mask+0: 69(-2.9,3.4)
  rect 2.6x3.1 smd paste-3: 70(-2.9,0) 71(-2.9,-3.4) 72(0,-3.4) 73(2.9,-3.4) 74(2.9,0) 75(2.9,3.4) 76(0,3.4) 77(0,0)
Top Layer:
  region: -1.6,1.85 -4.2,1.85 -4.2,3.92 -3.17,4.95 -1.6,4.95
Top Overlay:
  circle w0.2: c-9.45,6.55 r0.1
  lines w0.127: -7.85,-6.7 -7.85,-8.8 -5.05,-8.8 ; -7.85,6.7 -7.85,8.8 -5.05,8.8 ; 5.05,-8.8 7.85,-8.8 7.85,-6.7 ; 5.05,8.8 7.85,8.8 7.85,6.7
Top Paste:
  drawing of 184 lines, arcs and shapes, not listed
Top Solder:
  region: -1.5,1.75 -4.3,1.75 -4.3,4.02 -3.27,5.05 -1.5,5.05
Keep-Out Layer:
  region: 6.8,2.3 4.65,2.3 4.65,7.6 6.8,7.6
  region: 6.8,2.3 4.65,2.3 4.65,7.6 6.8,7.6
Mechanical 13:
  circle w0.2: c-9.45,6.55 r0.1
  lines w0.127: -7.85,-8.8 7.85,-8.8 7.85,8.8 -7.85,8.8 -7.85,-8.8
Mechanical 15:
  lines w0.05: -9.15,-6.85 -8.35,-6.85 -8.35,-9.3 -5.45,-9.3 -5.45,-10.1 5.45,-10.1 5.45,-9.3 8.35,-9.3 8.35,-6.85 9.15,-6.85 9.15,6.85 8.35,6.85 8.35,9.3 5.45,9.3 5.45,10.1 -5.45,10.1 -5.45,9.3 -8.35,9.3 -8.35,6.85 -9.15,6.85 -9.15,-6.85

## XDCR_C0720B001F [mm]
pads (2):
  rrect50% 0.76x1.94 smd: 1(-0.6,-5.02) 2(0.6,-5.02)
Top Overlay:
  circle w0.127: c0,1.97 r3.5
  circle w0.2: c-1.6,-5 r0.1
  lines w0.127: -1,-3.725 -1,-2.73 ; -1,-1.425 -1,-2.73 ; 1,-3.725 1,-2.73 ; 1,-1.425 1,-2.73 ; -1,-2.73 1,-2.73
Mechanical 13:
  circle w0.127: c0,1.97 r3.5
  lines w0.127: -1,-2.725 1,-2.725 1,-1.425 ; -1,-1.425 -1,-5.53 1,-5.53 1,-2.73
Mechanical 15:
  lines w0.05: -4,-1.875 -1.5,-1.875 -1.5,-5.875 1.5,-5.875 1.5,-1.875 4,-1.875 4,5.875 -4,5.875 -4,-1.875
3D body "C0720B001F--3DModel-STEP-56544.STEP": height 1.9, standoff -0.2, extent -3.5,-5.6 3.5,5.4

## XDCR_CMI-1210-5-95T [mm]
height 10
pads (2):
  round 2.5 hole 0.8: N(3.25,0)
  rect 2.5x2.5 / inner round 2.5 / far side rect 2.5x2.5 hole 0.8: P(-3.25,0)
Top Overlay:
  circle w0.127: c0,0 r6
  lines w0.127: -8.69,0 -6.69,0 ; -7.69,-1 -7.69,1 ; 6.92,0 8.92,0
Mechanical 13:
  circle w0.127: c0,0 r6
  lines w0.127: -8.69,0 -6.69,0 ; -7.69,-1 -7.69,1 ; 6.92,0 8.92,0
Mechanical 15:
  circle w0.05: c0,0 r6.25
3D body "step_temp.STEP": height 7, standoff -7, extent -6,-6 6,6

## XDCR_LIS3DHTR [mm]
pads (16):
  rect 0.45x0.35 smd paste-1 mask+0: 1(-1.225,1) 2(-1.225,0.5) 3(-1.225,0) 4(-1.225,-0.5) 5(-1.225,-1) 9(1.225,-1) 10(1.225,-0.5) 11(1.225,0) 12(1.225,0.5) 13(1.225,1)
  rect 0.35x0.45 smd paste-1 mask+0: 6(-0.5,-1.225) 7(0,-1.225) 8(0.5,-1.225) 14(0.5,1.225) 15(0,1.225) 16(-0.5,1.225)
Top Overlay:
  circle w0.2: c-2,1.275 r0.1
  lines w0.127: -1.5,-1.5 -0.99,-1.5 ; -1.5,1.5 -0.99,1.5 ; 0.99,-1.5 1.5,-1.5 ; 0.99,1.5 1.5,1.5
Top Paste:
  region: 0.14,-1.405 -0.14,-1.405 -0.14,-1.045 0.14,-1.045
  region: -1.045,-0.14 -1.405,-0.14 -1.405,0.14 -1.045,0.14
  region: 1.405,-0.14 1.045,-0.14 1.045,0.14 1.405,0.14
  region: 0.14,1.045 -0.14,1.045 -0.14,1.405 0.14,1.405
  region: -0.36,1.045 -0.64,1.045 -0.64,1.405 -0.36,1.405
  region: 0.64,1.045 0.36,1.045 0.36,1.405 0.64,1.405
  region: 1.405,0.36 1.045,0.36 1.045,0.64 1.405,0.64
  region: 1.405,0.86 1.045,0.86 1.045,1.14 1.405,1.14
  region: 1.405,-0.64 1.045,-0.64 1.045,-0.36 1.405,-0.36
  region: 1.405,-1.14 1.045,-1.14 1.045,-0.86 1.405,-0.86
  region: 0.64,-1.405 0.36,-1.405 0.36,-1.045 0.64,-1.045
  region: -0.36,-1.405 -0.64,-1.405 -0.64,-1.045 -0.36,-1.045
  region: -1.045,-0.64 -1.405,-0.64 -1.405,-0.36 -1.045,-0.36
  region: -1.045,-1.14 -1.405,-1.14 -1.405,-0.86 -1.045,-0.86
  region: -1.045,0.36 -1.405,0.36 -1.405,0.64 -1.045,0.64
  region: -1.045,0.86 -1.405,0.86 -1.405,1.14 -1.045,1.14
Top Solder:
  region: -0.95,-0.225 -1.5,-0.225 -1.5,0.225 -0.95,0.225
  region: 1.5,-0.225 0.95,-0.225 0.95,0.225 1.5,0.225
  region: 0.225,0.95 -0.225,0.95 -0.225,1.5 0.225,1.5
  region: 0.225,-1.5 -0.225,-1.5 -0.225,-0.95 0.225,-0.95
  region: -0.275,0.95 -0.725,0.95 -0.725,1.5 -0.275,1.5
  region: 0.725,0.95 0.275,0.95 0.275,1.5 0.725,1.5
  region: -0.95,0.275 -1.5,0.275 -1.5,0.725 -0.95,0.725
  region: -0.95,0.775 -1.5,0.775 -1.5,1.225 -0.95,1.225
  region: -0.95,-0.725 -1.5,-0.725 -1.5,-0.275 -0.95,-0.275
  region: -0.95,-1.225 -1.5,-1.225 -1.5,-0.775 -0.95,-0.775
  region: -0.275,-1.5 -0.725,-1.5 -0.725,-0.95 -0.275,-0.95
  region: 0.725,-1.5 0.275,-1.5 0.275,-0.95 0.725,-0.95
  region: 1.5,-0.725 0.95,-0.725 0.95,-0.275 1.5,-0.275
  region: 1.5,-1.225 0.95,-1.225 0.95,-0.775 1.5,-0.775
  region: 1.5,0.275 0.95,0.275 0.95,0.725 1.5,0.725
  region: 1.5,0.775 0.95,0.775 0.95,1.225 1.5,1.225
Mechanical 13:
  circle w0.2: c-2,1.275 r0.1
  lines w0.127: -1.5,-1.5 -1.5,1.5 1.5,1.5 1.5,-1.5 -1.5,-1.5
Mechanical 15:
  lines w0.05: -1.75,-1.75 -1.75,1.75 1.75,1.75 1.75,-1.75 -1.75,-1.75
3D body "step_temp.STEP": height 1, standoff 0, extent -1.5,-1.5 1.5,1.5